# Altium footprint library SHOU_HAN_TS36CA-0.6 250gf 031.PcbLib: 1 footprints
Each footprint in its own frame and in the unit in brackets; x right, y up, seen from the top. Pads: shape width x height; smd on the part's side, far side on the other; paste and mask are expansions set on the pad; w line width, h text height; cw(c..) or ccw(c..) is an arc to the next point about the centre after c.
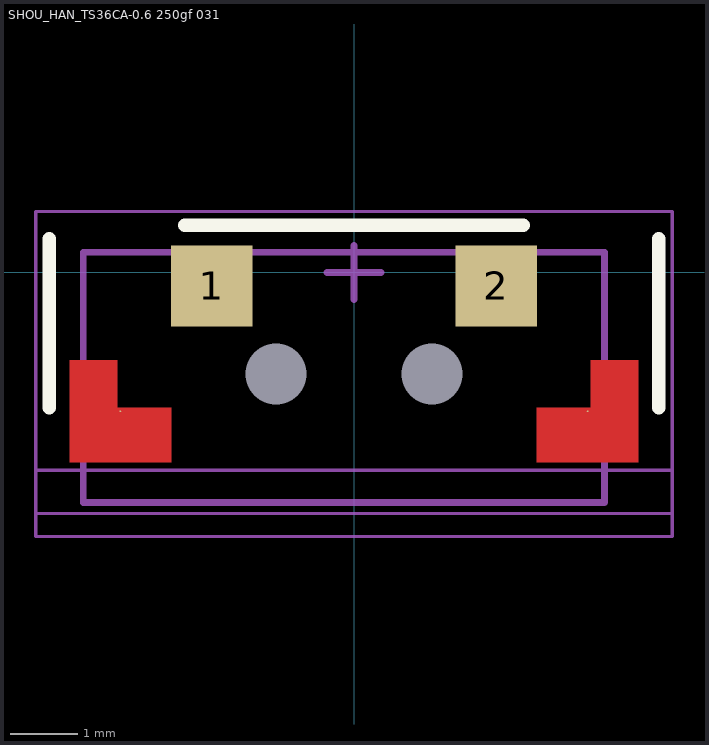
[diagram p0: the footprint, top view; thin cyan lines are the x and y axes]

## SHOU_HAN_TS36CA-0.6 250gf 031 [mm]
height 3.8
pads (6):
  round 0.025 smd: 0(-3.45,-2.05) 0(3.45,-2.05)
  round 0 hole 0.9 unplated: 0(-1.15,-1.5) 0(1.15,-1.5)
  rect 1.2x1.2 smd: 1(-2.1,-0.2) 2(2.1,-0.2)
Top Layer:
  region: 2.7,-2 3.5,-2 3.5,-1.3 4.2,-1.3 4.2,-2.8 2.7,-2.8
  region: -2.7,-2 -3.5,-2 -3.5,-1.3 -4.2,-1.3 -4.2,-2.8 -2.7,-2.8
Top Overlay:
  lines w0.2: -4.5,-2 -4.5,0.5 ; -2.5,0.7 2.5,0.7 ; 4.5,-2 4.5,0.5
Mechanical 13:
  lines w0.1: -4,-3.4 3.7,-3.4 3.7,0.3 -4,0.3 -4,-3.4
Mechanical 15:
  lines w0.05: -4.7,-3.56 4.7,-3.56 ; -4.7,-2.92 4.7,-2.92 ; -4.7,-3.9 4.7,-3.9 4.7,0.9 -4.7,0.9 -4.7,-3.9
  lines w0.1: -0.4,0 0.4,0 ; 0,-0.4 0,0.4
  text "Button Tip" at -1.714,-3.483 h0.5
  text "Bump" at -0.902,-2.703 h0.5
3D body "SHOU HAN TS36CA-0.6_v1.step": height 3.44, standoff -0.48, extent -3.945,-3.402 3.655,0.24